# Altium footprint library CHIP-Library.PcbLib: 345 footprints (part 22 of 22)
Each footprint in its own frame and in the unit in brackets; x right, y up, seen from the top. Pads: shape width x height; smd on the part's side, far side on the other; paste and mask are expansions set on the pad; w line width, h text height; cw(c..) or ccw(c..) is an arc to the next point about the centre after c.
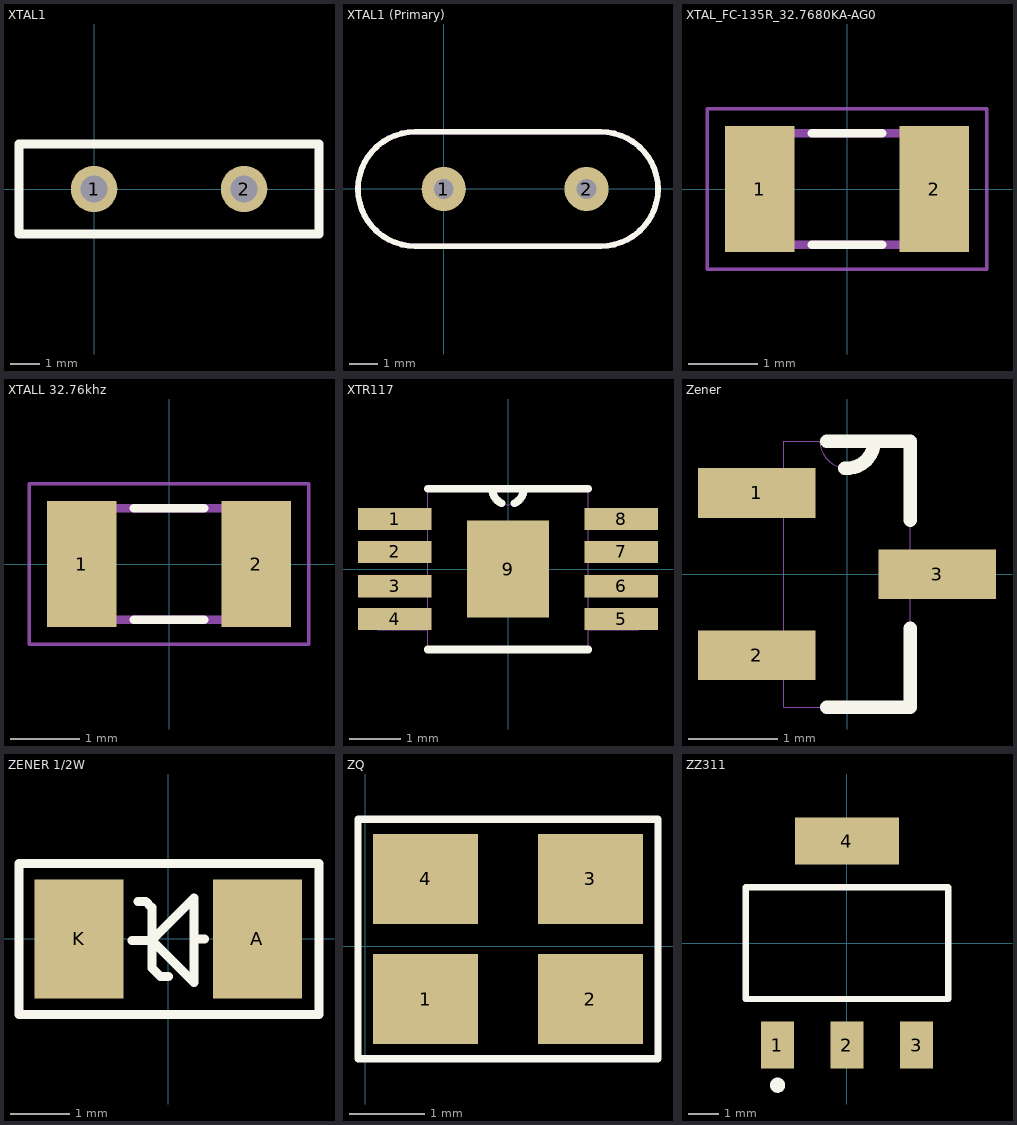
[diagram p21: the footprints below, top view; thin cyan lines are the x and y axes]

## XTAL1 [mil]
height 170.08
pads (2):
  round 62 hole 35.43: 1(0,0) 2(200,0)
Top Overlay:
  lines w12: -100,-60 300,-60 300,60 -100,60 -100,-60

## XTAL1 (Primary) [mm]
pads (2):
  round 1.575 hole 0.7 paste-2539.97 mask+0.1: 1(-0.009,-0.005) 2(5.071,-0.005)
Top Overlay:
  lines w0.2: -1.025,-2.037 cw(c-1.025,-0.005) -1.025,2.027 5.579,2.027 cw(c5.579,-0.005) 5.579,-2.037 -1.025,-2.037
Mechanical 4:
  lines w0.2: -1.025,-2.037 cw(c-1.025,-0.005) -1.025,2.027 5.579,2.027 cw(c5.579,-0.005) 5.579,-2.037 -1.025,-2.037

## XTAL_FC-135R_32.7680KA-AG0 [mm]
pads (2):
  rect 1x1.8 smd: 1(-1.25,0) 2(1.25,0)
Top Overlay:
  lines w0.127: -0.5,-0.8 0.5,-0.8 ; -0.5,0.8 0.5,0.8
Mechanical 4:
  lines w0.127: -1.65,-0.8 -1.65,0.8 ; -1.65,-0.8 1.65,-0.8 ; -1.65,-0.8 -1.65,0.8 ; -1.65,-0.8 1.65,-0.8 ; -1.65,0.8 1.65,0.8 ; -1.65,0.8 1.65,0.8 ; 1.65,-0.8 1.65,0.8 ; 1.65,-0.8 1.65,0.8
Mechanical 16:
  lines w0.05: -2,-1.15 -2,1.15 2,1.15 2,-1.15 -2,-1.15
3D body "User Library-ABS07.STEP": height 0.92, standoff 0.01, extent -1.61,-0.76 1.61,0.76

## XTALL 32.76khz [mm]
pads (2):
  rect 1x1.8 smd: 1(-1.25,0) 2(1.25,0)
Top Overlay:
  lines w0.127: -0.5,-0.8 0.5,-0.8 ; -0.5,0.8 0.5,0.8
Mechanical 4:
  lines w0.127: -1.65,-0.8 -1.65,0.8 ; -1.65,-0.8 1.65,-0.8 ; -1.65,-0.8 -1.65,0.8 ; -1.65,-0.8 1.65,-0.8 ; -1.65,0.8 1.65,0.8 ; -1.65,0.8 1.65,0.8 ; 1.65,-0.8 1.65,0.8 ; 1.65,-0.8 1.65,0.8
Mechanical 16:
  lines w0.05: -2,-1.15 -2,1.15 2,1.15 2,-1.15 -2,-1.15
3D body "User Library-ABS07.STEP": height 0.92, standoff 0.01, extent -1.61,-0.76 1.61,0.76

## XTR117 [mil]
pads (9):
  rect 56x17 smd: 1(-86,38) 2(-86,13) 3(-86,-13) 4(-86,-38) 5(86,-38) 6(86,-13) 7(86,13) 8(86,38)
  rect 62x74 smd: 9(0,0)
Top Overlay:
  lines w6: -61,-61 61,-61 ; -61,61 -12,61 ; -4.99,50 cw(c0.48,61.21) -12,60.99 ; 4.99,50 ccw(c-0.48,61.21) 12,60.99 ; 61,61 12,61 ; -12,61 12,61
Mechanical 1:
  lines w0: -12,61 ccw(c0,61) 12,61 ; -12,61 -61,61 -61,-61 61,-61 61,61 12,61 ; -12,61 12,61 ; -99,-46 -61,-46 -61,-31 -99,-31 -99,-46 ; -99,-20 -61,-20 -61,-5 -99,-5 -99,-20 ; -99,5 -61,5 -61,20 -99,20 -99,5 ; -99,31 -61,31 -61,46 -99,46 -99,31 ; 61,-46 99,-46 99,-31 61,-31 61,-46 ; 61,-20 99,-20 99,-5 61,-5 61,-20 ; 61,5 99,5 99,20 61,20 61,5 ; 61,31 99,31 99,46 61,46 61,31
3D body "XTR117AIDGKR.STEP": height 43.31, standoff 0, extent -96.46,-59.06 96.45,59.06

## Zener [mil]
pads (3):
  rect 52x22 smd: 1(-40,36) 2(-40,-36) 3(40,0)
Top Overlay:
  lines w6: -9,-59 28,-59 28,-24 ; -9,59 12,59 28,59 28,24 ; -1.04,47 ccw(c0,58.96) 12,58.96
Mechanical 4:
  lines w0: -49,-46 -28,-46 ; -49,-46 -49,-26 ; -49,-46 -28,-46 ; -49,-46 -49,-26 ; -49,-26 -28,-26 ; -49,-26 -28,-26 ; -49,26 -28,26 ; -49,26 -49,46 ; -49,26 -28,26 ; -49,26 -49,46 ; -49,46 -28,46 ; -49,46 -28,46 ; -28,-59 -28,-46 ; -28,-59 28,-59 ; -28,-59 -28,-46 ; -28,-59 28,-59 ; -28,-46 -28,-26 ; -28,-46 -28,-26 ; -28,-26 -28,26 ; -28,-26 -28,26 ; -28,26 -28,46 ; -28,26 -28,46 ; -28,46 -28,59 ; -28,46 -28,59 ; -28,59 -12,59 ; -28,59 -12,59 ; -12,59 ccw(c0,59) 12,59 ; -12,59 ccw(c0,59) 12,59 ; -12,59 12,59 ; -12,59 12,59 ; 12,59 28,59 ; 12,59 28,59 ; 28,-59 28,-10 ; 28,-59 28,-10 ; 28,-10 49,-10 ; 28,-10 28,10 ; 28,-10 49,-10 ; 28,-10 28,10 ; 28,10 49,10 ; 28,10 28,59 ; 28,10 49,10 ; 28,10 28,59 ; 49,-10 49,10 ; 49,-10 49,10
3D body "CircuitWorks-SOT-23.step": height 43.81, standoff 0.5, extent -49.21,-59.05 49.21,59.06

## ZENER 1/2W [mm]
pads (2):
  rect 1.5x2 smd: A(1.5,0) K(-1.5,0)
Top Overlay:
  lines w0.152: -0.613,-0.022 -0.276,-0.022 ; -0.508,0.635 -0.381,0.635 -0.276,0.53 -0.276,0.403 -0.276,-0.486 -0.127,-0.635 0,-0.635 ; 0.432,-0.004 0.613,-0.004 ; -0.276,-0.022 0.433,0.687 0.433,-0.731 -0.276,-0.022 ; -2.515,-1.27 -2.515,1.27 2.54,1.27 2.54,-1.27 -2.515,-1.27
3D body "User Library-smd diode 1206.STEP": height 1.48, standoff 0.03, extent -1.804,-0.707 1.696,0.743

## ZQ [mm]
pads (4):
  rect 1.4x1.2 smd: 1(0.8,-0.7) 2(3,-0.7) 3(3,0.9) 4(0.8,0.9)
Top Overlay:
  lines w0.1: -0.1,-1.5 -0.1,1.7 3.9,1.7 3.9,-1.5 -0.1,-1.5
3D body "ZQ3225.STEP": height 0.82, standoff 0, extent 0.3,-1.15 3.5,1.35

## ZZ311 [mm] "SOT-223/SC-73; 4 Leads; Body 6.7 x 7.3 mm, inc. leads (LxW max)"
height 1.8
pads (4):
  rect 1.1x1.55 smd: 1(-2.3,-3.375) 2(0,-3.375) 3(2.3,-3.375)
  rect 3.45x1.55 smd: 4(0,3.375)
Top Overlay:
  circle w0.25: c-2.3,-4.7 r0.125
  lines w0.2: -3.35,-1.85 3.35,-1.85 3.35,1.85 -3.35,1.85 -3.35,-1.85